# Altium footprint library Relay$.PcbLib: 38 footprints (part 3 of 3)
Each footprint in its own frame and in the unit in brackets; x right, y up, seen from the top. Pads: shape width x height; smd on the part's side, far side on the other; paste and mask are expansions set on the pad; w line width, h text height; cw(c..) or ccw(c..) is an arc to the next point about the centre after c.
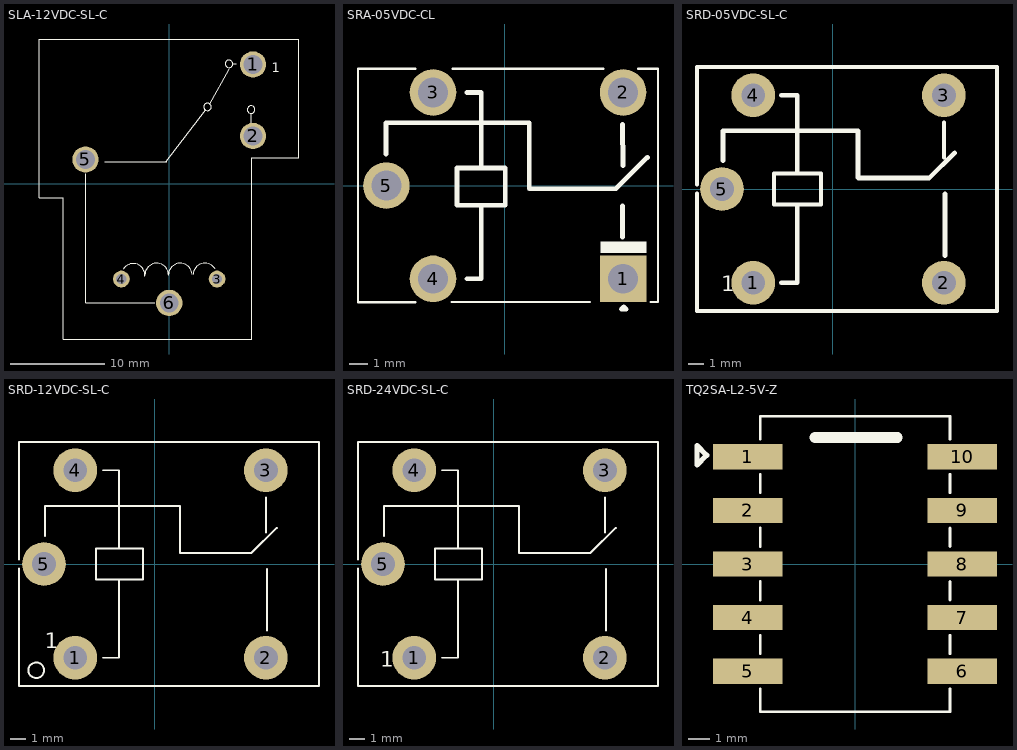
[diagram p2: the footprints below, top view; thin cyan lines are the x and y axes]

## SLA-12VDC-SL-C [mil]
pads (6):
  round 110 hole 78.74 paste-99999 mask+2: 1(350.39,498.81) 5(-350.39,101.19)
  round 110 hole 78.8 paste-99999 mask+2: 2(350.39,199.59)
  round 70 hole 43.4 paste-99999 mask+2: 3(200,-398.81) 4(-200,-398.81)
  round 110.24 hole 78.74 paste-99999 mask+2: 6(0,-498.81)
Top Overlay:
  circle w5: c160,321.19 r15.8
  circle w5: c342.53,309.89 r15.8
  circle w5: c250,501.19 r15.8
  lines w5: -350,41.19 -350,-498.81 -60,-498.81 ; -270,91.19 -10,91.19 ; -192.74,-357.47 cw(c-150.9,-383.8) -101.53,-386.19 ; -101.53,-382.29 cw(c-52.29,-381.39) -3.13,-378.39 ; -12.44,93.63 152.13,309.38 ; -3.13,-382.29 cw(c46.11,-381.39) 95.27,-378.39 ; 100.08,-378.56 cw(c149.25,-381.39) 191.84,-356.67 ; 170,331.19 251.72,479.38 ; 265.79,501.2 280,501.19 ; 342.52,238.98 342.52,294.1 ; -543.3,-59.06 -543.3,605.12 539.37,605.12 541.34,605.12 541.34,108.27 354.33,108.27 344.49,108.27 344.49,-649.61 -442.91,-649.61 -442.91,-59.06 -541.34,-59.06 -543.3,-59.06
  text "1" at 427.87,467.07 h39.37
3D body "C125736.step": height 803.15, standoff -137.79, extent -545.28,-652.76 541.34,607.48

## SRA-05VDC-CL [mm]
pads (5):
  rect 2.5x2.5 hole 1.6: 1(6.35,-5)
  round 2.5 hole 1.6: 2(6.35,5) 3(-3.85,5) 4(-3.85,-5) 5(-6.35,0)
Top Overlay:
  region: 7.614,-3.624 7.614,-2.989 5.125,-2.989 5.125,-3.624
  lines w0.127: -4.798,-6.251 -7.877,-6.251 -7.877,6.276 -4.798,6.276 ; -2.845,-6.245 4.572,-6.245 ; -2.807,6.276 5.3,6.276 ; 7.163,6.278 8.225,6.278 8.225,-6.245 7.823,-6.245
  lines w0.254: -6.378,1.702 -6.378,3.378 1.321,3.378 1.321,-0.174 5.969,-0.174 7.658,1.515 ; -2.028,-5 -1.266,-5 -1.266,-1.057 ; -2.028,5 -1.266,5 -1.266,0.949 ; 6.322,-2.765 6.322,-1.088 ; 6.322,3.298 6.35,1.071 ; -1.266,-1.057 -2.561,-1.057 -2.561,0.949 -1.266,0.949 ; -1.266,-1.057 0.029,-1.057 0.029,0.949 -1.266,0.949 ; 6.261,-6.638 6.515,-6.638 6.388,-6.511 6.261,-6.638
3D body "SRA-05VDC-CL.STEP": height 15.2, standoff -1.9, extent -7.826,-6.196 8.174,6.214

## SRD-05VDC-SL-C [mil]
pads (5):
  round 110 hole 60 paste-99999 mask+2: 1(-200.79,-236.22) 2(279.52,-236.2) 3(279.53,236.2) 4(-200.79,236.22) 5(-279.53,0)
Top Overlay:
  lines w10: -342.49,-11.6 -342.49,-307.09 413.43,-307.09 ; -342.49,11.6 -342.49,307.09 413.42,307.09 413.43,-307.09 ; 279.5,79.5 279.5,167.2 ; -148.62,-39.37 -30.51,-39.37 -30.51,39.37 -148.62,39.37 -148.62,-39.37
  lines w11.81: -276.84,70.87 -276.84,146.74 63.16,146.74 63.16,28.63 64.11,27.68 222.22,27.68 242.22,27.68 ; -130.31,-236.22 -90.24,-236.22 -90.24,-41.39 ; -130.31,236.22 -90.24,236.22 -90.24,41.37 ; 242.13,27.6 307.11,90.9 ; 282.22,-167.6 282.22,-12.3
  text "1" at -280.79,-258.22 h39.37
3D body "C35449.step": height 641.73, standoff -137.79, extent -343.07,-307.09 412.83,307.48

## SRD-12VDC-SL-C [mil]
pads (5):
  round 110 hole 60 paste-99999 mask+2: 1(-200.79,-236.22) 2(279.52,-236.2) 3(279.53,236.2) 4(-200.79,236.22) 5(-279.53,0)
Top Overlay:
  circle w5: c-299.21,-267.72 r19.69
  lines w5: -342.49,-11.6 -342.49,-307.09 413.43,-307.09 ; -342.49,11.6 -342.49,307.09 413.42,307.09 413.43,-307.09 ; -276.84,70.87 -276.84,146.74 63.16,146.74 63.16,28.63 64.11,27.68 222.22,27.68 242.22,27.68 ; -130.31,-236.22 -90.24,-236.22 -90.24,-41.39 ; -130.31,236.22 -90.24,236.22 -90.24,41.37 ; 242.13,27.6 307.11,90.9 ; 279.5,79.5 279.5,167.2 ; 282.22,-167.6 282.22,-12.3 ; -148.62,-39.37 -30.51,-39.37 -30.51,39.37 -148.62,39.37 -148.62,-39.37
  text "1" at -277.13,-212.13 h39.37
3D body "C30431.step": height 641.73, standoff -137.79, extent -343.07,-307.09 412.83,307.48

## SRD-24VDC-SL-C [mil]
pads (5):
  round 110 hole 60 paste-99999 mask+2: 1(-200.79,-236.22) 2(279.52,-236.2) 3(279.53,236.2) 4(-200.79,236.22) 5(-279.53,0)
Top Overlay:
  lines w5: -342.49,-11.6 -342.49,-307.09 413.43,-307.09 ; -342.49,11.6 -342.49,307.09 413.42,307.09 413.43,-307.09 ; -276.84,70.87 -276.84,146.74 63.16,146.74 63.16,28.63 64.11,27.68 222.22,27.68 242.22,27.68 ; -130.31,-236.22 -90.24,-236.22 -90.24,-41.39 ; -130.31,236.22 -90.24,236.22 -90.24,41.37 ; 242.13,27.6 307.11,90.9 ; 279.5,79.5 279.5,167.2 ; 282.22,-167.6 282.22,-12.3 ; -148.62,-39.37 -30.51,-39.37 -30.51,39.37 -148.62,39.37 -148.62,-39.37
  text "1" at -285.86,-258.77 h39.37
3D body "C15840.step": height 641.73, standoff -137.79, extent -343.07,-307.09 412.83,307.48

## TQ2SA-L2-5V-Z [mm]
pads (10):
  rect 3.3x1.2 smd: 1(-5.08,5.08) 2(-5.08,2.54) 3(-5.08,0) 4(-5.08,-2.54) 5(-5.08,-5.08) 6(5.08,-5.08) 7(5.08,-2.54) 8(5.08,0) 9(5.08,2.54) 10(5.08,5.08)
Top Overlay:
  lines w0.127: -4.5,-5.911 -4.5,-7 4.5,-7 4.5,-5.911 ; -4.5,-4.249 -4.5,-3.371 ; -4.5,-1.709 -4.5,-0.831 ; -4.5,0.831 -4.5,1.709 ; -4.5,3.371 -4.5,4.249 ; -4.5,5.911 -4.5,7 4.5,7 4.5,5.911 ; 4.5,-4.249 4.5,-3.371 ; 4.5,-1.709 4.5,-0.831 ; 4.5,0.831 4.5,1.709 ; 4.5,3.371 4.5,4.249
  lines w0.254: -7.493,4.699 -7.036,5.156 -7.493,5.613 -7.493,4.699
  lines w0.508: -1.9,6 2,6
3D body "C2684450.step": height 5.6, standoff 0, extent -5.75,-7 5.75,7